# Altium footprint library C320C104K5R5TA.PcbLib: 1 footprints
Each footprint in its own frame and in the unit in brackets; x right, y up, seen from the top. Pads: shape width x height; smd on the part's side, far side on the other; paste and mask are expansions set on the pad; w line width, h text height; cw(c..) or ccw(c..) is an arc to the next point about the centre after c.
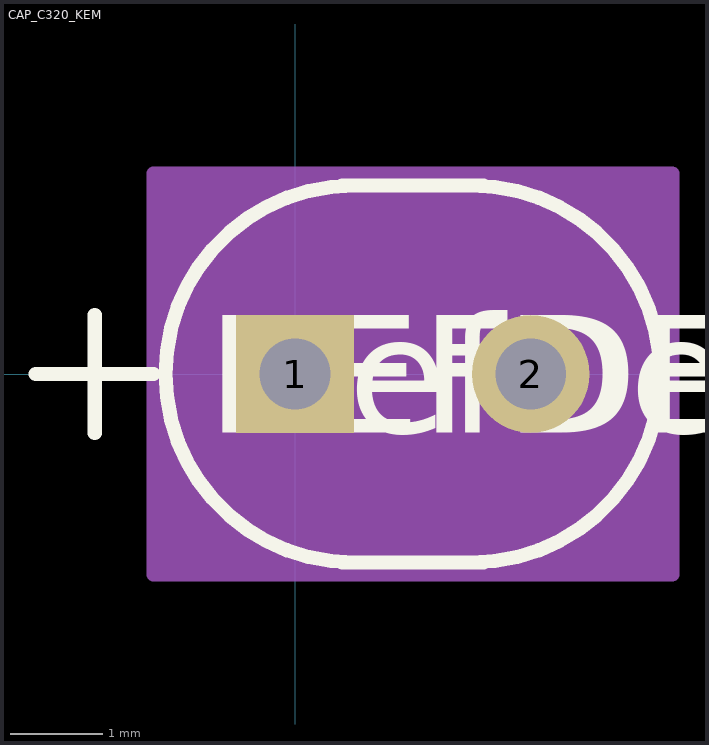
[diagram p0: the footprint, top view; thin cyan lines are the x and y axes]

## CAP_C320_KEM [mil]
pads (2):
  rect 50x50 / inner round 60 / far side rect 50x50 hole 30 paste-25 mask-25: 1(0,0)
  round 50 / inner round 60 / far side round 50 hole 30 paste-25 mask-25: 2(100,0)
Top Overlay:
  lines w6: -110,0 -60,0 ; -85,-25 -85,25 ; 20,-80 80,-80 ; 20,80 80,80 ; 25,-80 cw(c25,0) 25,80 ; 75,-80 ccw(c75,0) 155,0 ccw(c75,0) 75,80
  text "RefDes" at -25,-25 h50
  text "REFDES" at -37.5,-25 h50
Mechanical 13:
  lines w0: 25,-75 cw(c25,0) 25,75 ; 75,-75 ccw(c75,0) 75,75
  lines w1: -110,0 -60,0 ; -85,-25 -85,25 ; 25,-75 75,-75 ; 25,75 75,75
  text "RefDes2" at -37.5,-25 h50
Mechanical 15:
  region: 160,-85 -60,-85 -60,85 160,85
  lines w6: -60,-85 -60,85 160,85 160,-85 -60,-85
3D body "CAP_C320_KEM.step": height 260, standoff -160, extent -50,-75 150,75